# Altium footprint library WR-DSUB.PcbLib: 64 footprints (part 2 of 4)
Each footprint in its own frame and in the unit in brackets; x right, y up, seen from the top. Pads: shape width x height; smd on the part's side, far side on the other; paste and mask are expansions set on the pad; w line width, h text height; cw(c..) or ccw(c..) is an arc to the next point about the centre after c.
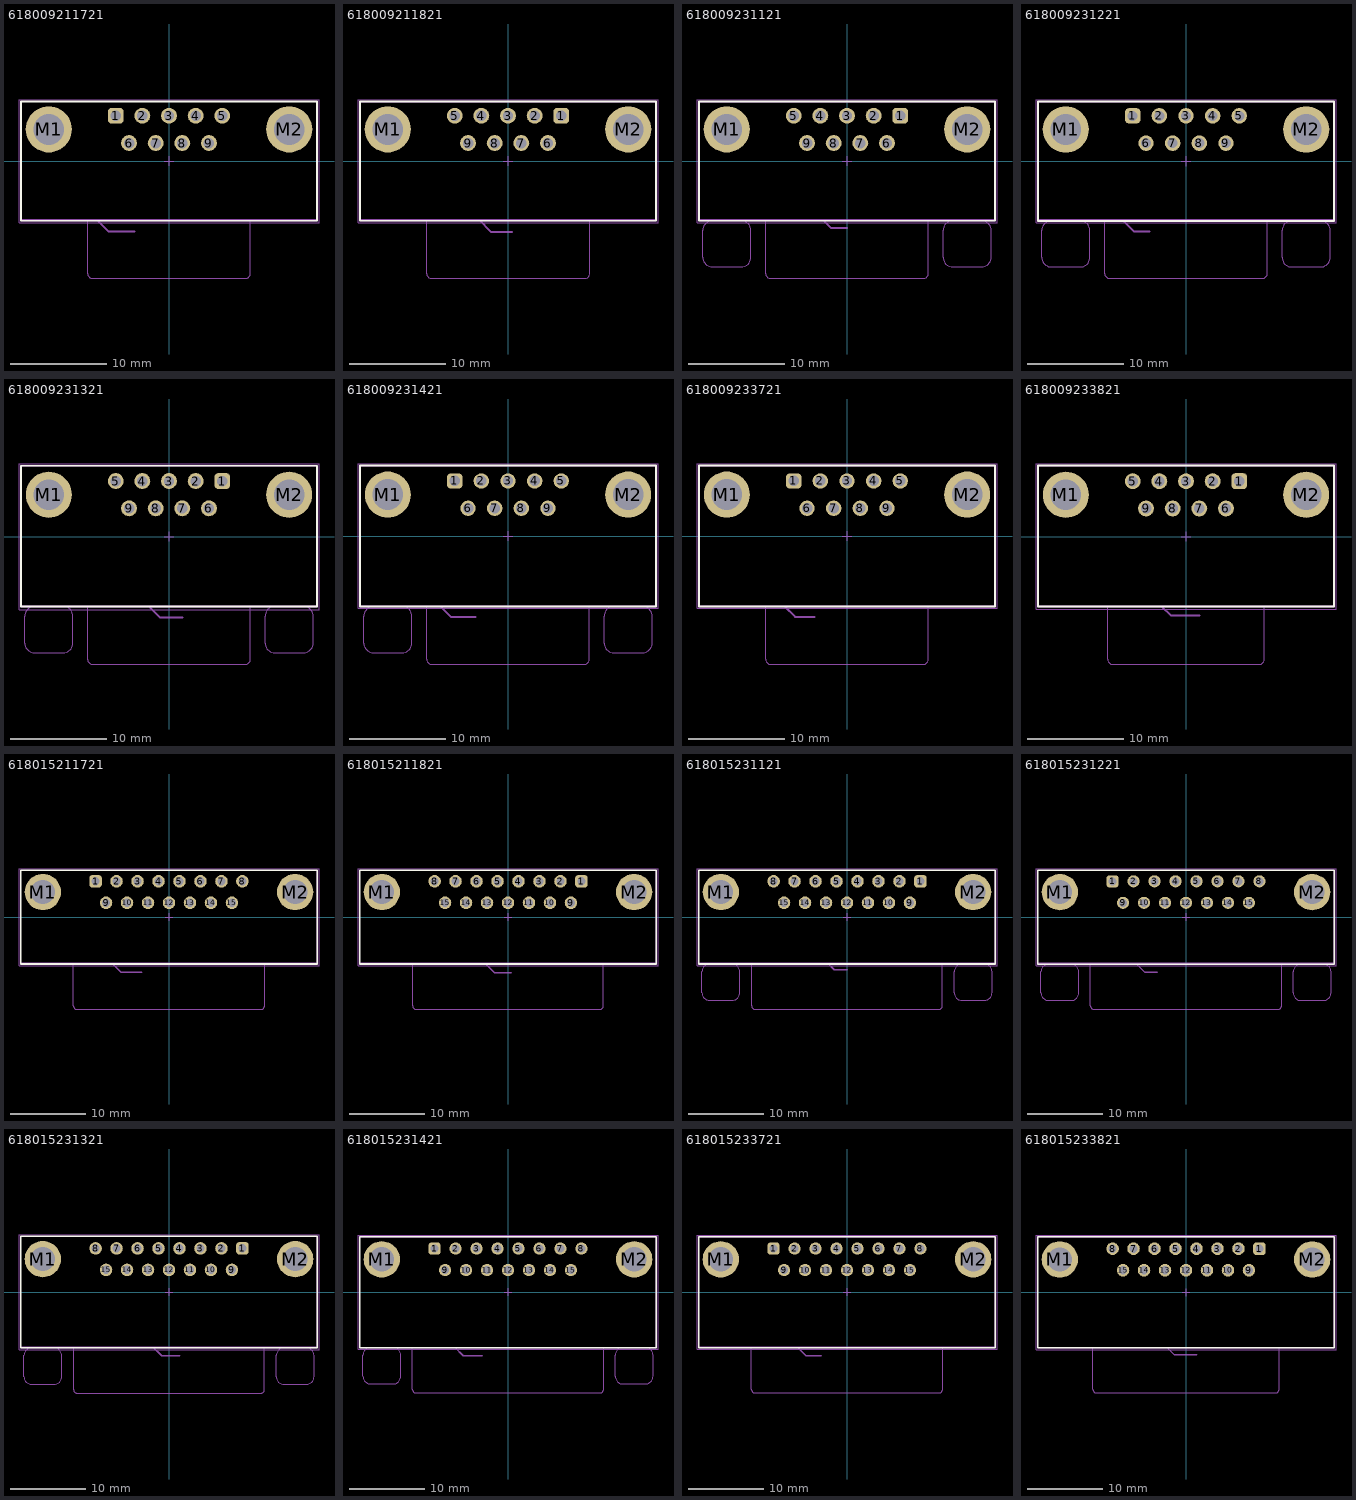
[diagram p1: the footprints below, top view; thin cyan lines are the x and y axes]

## 618009211721 [mm] "9 pins, right angled, 8.08mm, board lock & UNC4-40 rivet without hex screw"
height 12.5
pads (11):
  rrect50% 1.65x1.65 hole 1.09: 1(-5.54,4.72)
  round 1.65 hole 1.09: 2(-2.77,4.72) 3(0,4.72) 4(2.77,4.72) 5(5.54,4.72) 6(-4.155,1.88) 7(-1.385,1.88) 8(1.385,1.88) 9(4.155,1.88)
  round 4.8 hole 3.2: M1(-12.5,3.3) M2(12.5,3.3)
Top Overlay:
  lines w0.2: -15.4,-6.2 -15.4,6.2 15.4,6.2 15.4,-6.2 -15.4,-6.2
Assembly Notes:
  lines w0.2: -15.4,-6.12 15.4,-6.12 ; -7.5,-6.12 -6.32,-7.3 -3.6,-7.3
  text "PCB Edge" at -3.1,-7.8 h1.02
Top Assembly:
  lines w0.1: -8.46,-6.2 -8.46,-11.7 ccw(c-7.96,-11.7) -7.96,-12.2 7.96,-12.2 ; 8.46,-6.2 8.46,-11.7 cw(c7.96,-11.7) 7.96,-12.2 ; 7.96,-12.2 7.96,-12.2 ; -15.4,-6.2 15.4,-6.2 15.4,6.2 -15.4,6.2 -15.4,-6.2
Top Designator:
  text ".Designator" at -3.647,-0.357 h1
Top Courtyard:
  lines w0.05: -15.6,-6.4 -15.6,6.4 15.6,6.4 15.6,-6.4 -15.6,-6.4
Top Component Center:
  lines w0.1: -0.5,0 0.5,0 ; 0,-0.5 0,0.5
3D body "618009211721.stp": height 12.55, standoff -3.95, extent -15.4,-12.2 15.4,6.2

## 618009211821 [mm] "09p 8.08mm bracket, board lock & UNC4-40 Rivet without hex screw"
height 12.5
pads (11):
  rrect50% 1.65x1.65 hole 1.09: 1(5.54,4.72)
  round 1.65 hole 1.09: 2(2.77,4.72) 3(0,4.72) 4(-2.77,4.72) 5(-5.54,4.72) 6(4.155,1.88) 7(1.385,1.88) 8(-1.385,1.88) 9(-4.155,1.88)
  round 4.8 hole 3.2: M1(-12.5,3.3) M2(12.5,3.3)
Top Overlay:
  lines w0.2: -15.4,-6.2 -15.4,6.2 15.4,6.2 15.4,-6.2 -15.4,-6.2
Assembly Notes:
  lines w0.2: -15.4,-6.12 15.4,-6.12 ; -3,-6.12 -1.77,-7.35 0.4,-7.35
  text "PCB Edge" at 0.7,-8.05 h1.02
Top Assembly:
  lines w0.1: -8.45,-6.2 -8.45,-11.7 ccw(c-7.95,-11.7) -7.95,-12.2 ; -8,-12.2 8,-12.2 ccw(c8,-11.7) 8.5,-11.7 8.5,-6.2 ; -15.4,-6.2 15.4,-6.2 15.4,6.2 -15.4,6.2 -15.4,-6.2
Top Designator:
  text ".Designator" at -3.647,-0.357 h1
Top Courtyard:
  lines w0.05: -15.6,-6.4 15.6,-6.4 15.6,6.4 -15.6,6.4 -15.6,-6.4
Top Component Center:
  lines w0.1: -0.5,0 0.5,0 ; 0,-0.5 0,0.5
3D body "618009211821.stp": height 12.55, standoff -3.95, extent -15.4,-12.2 15.4,6.2

## 618009231121 [mm] "9 pins, right angled, 8.08mm, with hex screw"
height 12.5
pads (11):
  rrect50% 1.65x1.65 hole 1.09: 1(5.54,4.72)
  round 1.65 hole 1.09: 2(2.77,4.72) 3(0,4.72) 4(-2.77,4.72) 5(-5.54,4.72) 6(4.155,1.88) 7(1.385,1.88) 8(-1.385,1.88) 9(-4.155,1.88)
  round 4.8 hole 3.2: M1(-12.5,3.3) M2(12.5,3.3)
Top Overlay:
  lines w0.2: -15.4,-6.2 -15.4,6.2 15.4,6.2 15.4,-6.2 -15.4,-6.2
Assembly Notes:
  lines w0.2: -15.4,-6.12 15.4,-6.12 ; -2.5,-6.12 -1.67,-6.95 0,-6.95
  text "PCB Edge" at 0.4,-7.55 h1.02
Top Assembly:
  lines w0.1: -14,-6.2 ccw(c-14,-7.2) -15,-7.2 -15,-10 ccw(c-14,-10) -14,-11 -11,-11 ccw(c-11,-10) -10,-10 -10,-7.2 ccw(c-11,-7.2) -11,-6.2 ; -8.45,-6.2 -8.45,-11.7 ccw(c-7.95,-11.7) -7.95,-12.2 7.95,-12.2 ; 8.45,-6.2 8.45,-11.7 cw(c7.95,-11.7) 7.95,-12.2 ; 11,-6.2 ccw(c11,-7.2) 10,-7.2 10,-10 ccw(c11,-10) 11,-11 14,-11 ccw(c14,-10) 15,-10 15,-7.2 ccw(c14,-7.2) 14,-6.2 ; 7.95,-12.2 7.95,-12.2 ; -15.4,-6.2 15.4,-6.2 15.4,6.2 -15.4,6.2 -15.4,-6.2
Top Designator:
  text ".Designator" at -3.647,-0.357 h1
Top Courtyard:
  lines w0.05: -15.6,-6.4 -15.6,6.4 15.6,6.4 15.6,-6.4 -15.6,-6.4
Top Component Center:
  lines w0.1: -0.5,0 0.5,0 ; 0,-0.5 0,0.5
3D body "618009231121.stp": height 12.55, standoff -3.95, extent -15.4,-12.2 15.4,6.2

## 618009231221 [mm] "9 pins, right angled, 8.08mm, with hex screw"
height 12.5
pads (11):
  rrect50% 1.6x1.6 hole 1.04: 1(-5.54,4.72)
  round 1.6 hole 1.04: 2(-2.77,4.72) 3(0,4.72) 4(2.77,4.72) 5(5.54,4.72) 6(-4.155,1.88) 7(-1.385,1.88) 8(1.385,1.88) 9(4.155,1.88)
  round 4.8 hole 3.2: M1(-12.5,3.3) M2(12.5,3.3)
Top Overlay:
  lines w0.2: -15.4,-6.2 -15.4,6.2 15.4,6.2 15.4,-6.2 -15.4,-6.2
Assembly Notes:
  lines w0.2: -15.4,-6.12 15.4,-6.12 ; -6.6,-6.12 -5.42,-7.3 -3.8,-7.3
  text "PCB Edge" at -3.4,-7.82 h1.02
Top Assembly:
  lines w0.1: -14,-6.2 ccw(c-14,-7.2) -15,-7.2 -15,-10 ccw(c-14,-10) -14,-11 -11,-11 ccw(c-11,-10) -10,-10 -10,-7.2 ccw(c-11,-7.2) -11,-6.2 ; -8.46,-6.2 -8.46,-11.68 ccw(c-7.96,-11.68) -7.96,-12.18 7.94,-12.18 ; 7.96,-12.18 ccw(c7.96,-11.68) 8.46,-11.68 8.46,-6.2 ; 11,-6.2 ccw(c11,-7.2) 10,-7.2 10,-10 ccw(c11,-10) 11,-11 14,-11 ccw(c14,-10) 15,-10 15,-7.2 ccw(c14,-7.2) 14,-6.2 ; -15.4,-6.2 15.4,-6.2 15.4,6.2 -15.4,6.2 -15.4,-6.2 ; 7.95,-12.18 7.95,-12.18
Top Designator:
  text ".Designator" at -3.647,-0.357 h1
Top Courtyard:
  lines w0.05: -15.6,-6.4 15.6,-6.4 15.6,6.4 -15.6,6.4 -15.6,-6.4
Top Component Center:
  lines w0.1: -0.5,0 0.5,0 ; 0,-0.5 0,0.5
3D body "618009231221.stp": height 12.57, standoff -3.97, extent -15.4,-12.2 15.4,6.2

## 618009231321 [mm] "9 pins, right angled, 10.3mm, with hex screw"
height 12.5
pads (11):
  rrect50% 1.65x1.65 hole 1.09: 1(5.54,5.78)
  round 1.65 hole 1.09: 2(2.77,5.78) 3(0,5.78) 4(-2.77,5.78) 5(-5.54,5.78) 6(4.155,2.94) 7(1.385,2.94) 8(-1.385,2.94) 9(-4.155,2.94)
  round 4.8 hole 3.2: M1(-12.495,4.36) M2(12.495,4.36)
Top Overlay:
  lines w0.2: -15.4,-7.28 15.4,-7.28 15.4,7.37 -15.4,7.37 -15.4,-7.28
Assembly Notes:
  lines w0.2: -15.4,-7.26 15.4,-7.26 ; -2.1,-7.26 -0.96,-8.4 1.4,-8.4
  text "PCB Edge" at 1.8,-8.8 h1.02
Top Assembly:
  lines w0.1: -14,-7.28 ccw(c-14,-8.28) -15,-8.28 -15,-11.08 ccw(c-14,-11.08) -14,-12.08 -11,-12.08 ccw(c-11,-11.08) -10,-11.08 -10,-8.28 ccw(c-11,-8.28) -11,-7.28 ; -8.45,-7.28 -8.45,-12.78 ccw(c-7.95,-12.78) -7.95,-13.28 7.95,-13.28 ; 8.45,-7.28 8.45,-12.78 cw(c7.95,-12.78) 7.95,-13.28 ; 11,-7.28 ccw(c11,-8.28) 10,-8.28 10,-11.08 ccw(c11,-11.08) 11,-12.08 14,-12.08 ccw(c14,-11.08) 15,-11.08 15,-8.28 ccw(c14,-8.28) 14,-7.28 ; 7.95,-13.28 7.95,-13.28 ; -15.4,-7.28 -15.4,7.37 15.4,7.37 15.4,-7.28 -15.4,-7.28
Top Designator:
  text ".Designator" at -3.647,-0.357 h1
Top Courtyard:
  lines w0.05: -15.6,-7.59 -15.6,7.59 15.6,7.59 15.6,-7.59 -15.6,-7.59
Top Component Center:
  lines w0.1: -0.5,0 0.5,0 ; 0,-0.5 0,0.5
3D body "618009231321.stp": height 12.57, standoff -3.77, extent -15.408,-13.28 15.408,7.37

## 618009231421 [mm] "9 pins, right angled, 10.3mm, with hex screw"
height 12.5
pads (11):
  rrect50% 1.6x1.6 hole 1.09: 1(-5.54,5.735)
  round 1.6 hole 1.09: 2(-2.77,5.735) 3(0,5.735) 4(2.77,5.735) 5(5.54,5.735) 6(-4.155,2.895) 7(-1.385,2.895) 8(1.385,2.895) 9(4.155,2.895)
  round 4.8 hole 3.2: M1(-12.495,4.315) M2(12.495,4.315)
Top Overlay:
  lines w0.2: -15.4,-7.325 -15.4,7.325 15.4,7.325 15.4,-7.325 -15.4,-7.325
Assembly Notes:
  lines w0.2: -15.4,-7.325 15.4,-7.325 ; -7,-7.325 -5.905,-8.42 -3.4,-8.42
  text "PCB Edge" at -3.1,-8.92 h1.02
Top Assembly:
  lines w0.1: -14,-7.325 ccw(c-14,-8.325) -15,-8.325 -15,-11.125 ccw(c-14,-11.125) -14,-12.125 -11,-12.125 ccw(c-11,-11.125) -10,-11.125 -10,-8.325 ccw(c-11,-8.325) -11,-7.325 ; -8.45,-7.325 -8.45,-12.825 ccw(c-7.95,-12.825) -7.95,-13.325 7.95,-13.325 ; 8.45,-7.325 8.45,-12.825 cw(c7.95,-12.825) 7.95,-13.325 ; 11,-7.325 ccw(c11,-8.325) 10,-8.325 10,-11.125 ccw(c11,-11.125) 11,-12.125 14,-12.125 ccw(c14,-11.125) 15,-11.125 15,-8.325 ccw(c14,-8.325) 14,-7.325 ; 7.95,-13.325 7.95,-13.325 ; -15.4,-7.325 15.4,-7.325 15.4,7.325 -15.4,7.325 -15.4,-7.325
Top Designator:
  text ".Designator" at -3.647,-0.357 h1
Top Courtyard:
  lines w0.05: -15.6,-7.525 15.6,-7.525 15.6,7.525 -15.6,7.525 -15.6,-7.525
Top Component Center:
  lines w0.1: -0.5,0 0.5,0 ; 0,-0.5 0,0.5
3D body "618009231421.stp": height 12.62, standoff -3.72, extent -15.405,-13.325 15.405,7.325

## 618009233721 [mm] "9 pins, right angled, 10.3mm, board lock & UNC4-40 rivet without hex screw"
height 12.5
pads (11):
  rrect50% 1.6x1.6 hole 1.09: 1(-5.54,5.735)
  round 1.6 hole 1.09: 2(-2.77,5.735) 3(0,5.735) 4(2.77,5.735) 5(5.54,5.735) 6(-4.155,2.895) 7(-1.385,2.895) 8(1.385,2.895) 9(4.155,2.895)
  round 4.8 hole 3.2: M1(-12.495,4.315) M2(12.495,4.315)
Top Overlay:
  lines w0.2: -15.4,-7.325 -15.4,7.325 15.4,7.325 15.4,-7.325 -15.4,-7.325
Assembly Notes:
  lines w0.2: -15.4,-7.305 15.4,-7.305 ; -6.5,-7.305 -5.405,-8.4 -3.4,-8.4
  text "PCB Edge" at -3.1,-9 h1.02
Top Assembly:
  lines w0.1: -8.46,-7.325 -8.46,-12.825 ccw(c-7.96,-12.825) -7.96,-13.325 7.96,-13.325 ccw(c7.96,-12.825) 8.46,-12.825 8.46,-7.325 ; -15.4,-7.325 15.4,-7.325 15.4,7.325 -15.4,7.325 -15.4,-7.325
Top Designator:
  text ".Designator" at -3.647,-0.357 h1
Top Courtyard:
  lines w0.05: -15.6,-7.525 -15.6,7.525 15.6,7.525 15.6,-7.525 -15.6,-7.525
Top Component Center:
  lines w0.1: -0.5,0 0.5,0 ; 0,-0.5 0,0.5
3D body "618009233721.stp": height 12.57, standoff -3.77, extent -15.408,-13.325 15.408,7.325

## 618009233821 [mm] "09p 10.3mm bracket, board lock & UNC4-40 Rivet without hex screw"
height 12.5
pads (11):
  rrect50% 1.65x1.65 hole 1.09: 1(5.54,5.765)
  round 1.65 hole 1.09: 2(2.77,5.765) 3(0,5.765) 4(-2.77,5.765) 5(-5.54,5.765) 6(4.155,2.925) 7(1.385,2.925) 8(-1.385,2.925) 9(-4.155,2.925)
  round 4.8 hole 3.2: M1(-12.495,4.345) M2(12.495,4.345)
Top Overlay:
  lines w0.2: -15.4,-7.275 15.4,-7.275 15.4,7.375 -15.4,7.375 -15.4,-7.275
Assembly Notes:
  lines w0.2: -15.4,-7.275 15.4,-7.275 ; -2.5,-7.275 -1.575,-8.2 1.4,-8.2
  text "PCB Edge" at 1.8,-8.7 h1.02
Top Assembly:
  lines w0.1: -8.15,-7.275 -8.15,-12.775 ccw(c-7.65,-12.775) -7.65,-13.275 7.65,-13.275 ; 8.15,-7.275 8.15,-12.775 cw(c7.65,-12.775) 7.65,-13.275 ; 7.65,-13.275 7.65,-13.275 ; -15.4,-7.275 -15.4,7.375 15.4,7.375 15.4,-7.275 -15.4,-7.275
Top Designator:
  text ".Designator" at -3.647,-0.357 h1
Top Courtyard:
  lines w0.05: -15.6,-7.575 -15.6,7.575 15.6,7.575 15.6,-7.575 -15.6,-7.575
Top Component Center:
  lines w0.1: -0.5,0 0.5,0 ; 0,-0.5 0,0.5
3D body "618009233821.stp": height 12.57, standoff -3.77, extent -15.408,-13.275 15.408,7.375

## 618015211721 [mm] "15 pins, right angled, 8.08mm, board lock & UNC4-40 rivet without hex screw"
height 12.5
pads (17):
  rrect50% 1.65x1.65 hole 1.09: 1(-9.695,4.72)
  round 1.65 hole 1.09: 2(-6.925,4.72) 3(-4.155,4.72) 4(-1.385,4.72) 5(1.385,4.72) 6(4.155,4.72) 7(6.925,4.72) 8(9.695,4.72) 9(-8.31,1.88) 10(-5.54,1.88) 11(-2.77,1.88) 12(0,1.88) 13(2.77,1.88) 14(5.54,1.88) 15(8.31,1.88)
  round 4.8 hole 3.2: M1(-16.65,3.3) M2(16.65,3.3)
Top Overlay:
  lines w0.2: -19.6,-6.2 -19.6,6.2 19.6,6.2 19.6,-6.2 -19.6,-6.2
Assembly Notes:
  lines w0.2: -19.6,-6.12 19.6,-6.12 ; -7.5,-6.12 -6.32,-7.3 -3.6,-7.3
  text "PCB Edge" at -3.1,-7.8 h1.02
Top Assembly:
  lines w0.1: -12.625,-6.2 -12.625,-11.7 ccw(c-12.125,-11.7) -12.125,-12.2 12.125,-12.2 ccw(c12.125,-11.7) 12.625,-11.7 12.625,-6.2 ; -19.6,-6.2 19.6,-6.2 19.6,6.2 -19.6,6.2 -19.6,-6.2
Top Designator:
  text ".Designator" at -3.647,-0.357 h1
Top Courtyard:
  lines w0.05: -19.8,-6.4 -19.8,6.4 19.8,6.4 19.8,-6.4 -19.8,-6.4
Top Component Center:
  lines w0.1: -0.5,0 0.5,0 ; 0,-0.5 0,0.5
3D body "618015211721.stp": height 12.55, standoff -3.95, extent -19.6,-12.2 19.6,6.2

## 618015211821 [mm] "15p 8.08mm bracket, board lock & UNC4-40 Rivet without hex screw"
height 12.5
pads (17):
  rrect50% 1.65x1.65 hole 1.09: 1(9.695,4.72)
  round 1.65 hole 1.09: 2(6.925,4.72) 3(4.155,4.72) 4(1.385,4.72) 5(-1.385,4.72) 6(-4.155,4.72) 7(-6.925,4.72) 8(-9.695,4.72) 9(8.31,1.88) 10(5.54,1.88) 11(2.77,1.88) 12(0,1.88) 13(-2.77,1.88) 14(-5.54,1.88) 15(-8.31,1.88)
  round 4.8 hole 3.2: M1(-16.65,3.3) M2(16.65,3.3)
Top Overlay:
  lines w0.2: -19.6,-6.2 -19.6,6.2 19.6,6.2 19.6,-6.2 -19.6,-6.2
Assembly Notes:
  lines w0.2: -19.6,-6.12 19.6,-6.12 ; -3,-6.12 -1.77,-7.35 0.4,-7.35
  text "PCB Edge" at 0.7,-8.05 h1.02
Top Assembly:
  lines w0.1: -12.6,-6.2 -12.6,-11.7 ccw(c-12.1,-11.7) -12.1,-12.2 ; -12.15,-12.2 12.1,-12.2 ccw(c12.1,-11.7) 12.6,-11.7 12.6,-6.2 ; -19.6,-6.2 19.6,-6.2 19.6,6.2 -19.6,6.2 -19.6,-6.2
Top Designator:
  text ".Designator" at -3.647,-0.357 h1
Top Courtyard:
  lines w0.05: -19.8,-6.4 -19.8,6.4 19.8,6.4 19.8,-6.4 -19.8,-6.4
Top Component Center:
  lines w0.1: -0.5,0 0.5,0 ; 0,-0.5 0,0.5
3D body "618015211821.stp": height 12.55, standoff -3.95, extent -19.6,-12.2 19.6,6.2

## 618015231121 [mm] "15 pins, right angled, 8.08mm, with hex screw"
height 12.5
pads (17):
  rrect50% 1.65x1.65 hole 1.09: 1(9.695,4.72)
  round 1.65 hole 1.09: 2(6.925,4.72) 3(4.155,4.72) 4(1.385,4.72) 5(-1.385,4.72) 6(-4.155,4.72) 7(-6.925,4.72) 8(-9.695,4.72) 9(8.31,1.88) 10(5.54,1.88) 11(2.77,1.88) 12(0,1.88) 13(-2.77,1.88) 14(-5.54,1.88) 15(-8.31,1.88)
  round 4.8 hole 3.2: M1(-16.65,3.3) M2(16.65,3.3)
Top Overlay:
  lines w0.2: -19.6,-6.2 19.6,-6.2 19.6,6.2 -19.6,6.2 -19.6,-6.2
Assembly Notes:
  lines w0.2: -19.6,-6.12 19.6,-6.12 ; -2.5,-6.12 -1.67,-6.95 0,-6.95
  text "PCB Edge" at 0.4,-7.55 h1.02
Top Assembly:
  lines w0.1: -18.15,-6.2 ccw(c-18.15,-7.2) -19.15,-7.2 -19.15,-10 ccw(c-18.15,-10) -18.15,-11 -15.15,-11 ccw(c-15.15,-10) -14.15,-10 -14.15,-7.2 ccw(c-15.15,-7.2) -15.15,-6.2 ; -12.6,-6.2 -12.6,-11.7 ccw(c-12.1,-11.7) -12.1,-12.2 12.1,-12.2 ccw(c12.1,-11.7) 12.6,-11.7 12.6,-6.2 ; 15.15,-6.2 ccw(c15.15,-7.2) 14.15,-7.2 14.15,-10 ccw(c15.15,-10) 15.15,-11 18.15,-11 ccw(c18.15,-10) 19.15,-10 19.15,-7.2 ccw(c18.15,-7.2) 18.15,-6.2 ; -19.6,-6.2 19.6,-6.2 19.6,6.2 -19.6,6.2 -19.6,-6.2 ; 3.8,-12.2 3.8,-12.2
Top Designator:
  text ".Designator" at -3.647,-0.357 h1
Top Courtyard:
  lines w0.05: -19.8,-6.4 -19.8,6.4 19.8,6.4 19.8,-6.4 -19.8,-6.4
Top Component Center:
  lines w0.1: -0.5,0 0.5,0 ; 0,-0.5 0,0.5
3D body "618015231121.stp": height 12.55, standoff -3.95, extent -19.6,-12.2 19.6,6.2

## 618015231221 [mm] "15 pins, right angled, 8.08mm, with hex screw"
height 12.5
pads (17):
  rrect50% 1.6x1.6 hole 1.04: 1(-9.695,4.72)
  round 1.6 hole 1.04: 2(-6.925,4.72) 3(-4.155,4.72) 4(-1.385,4.72) 5(1.385,4.72) 6(4.155,4.72) 7(6.925,4.72) 8(9.695,4.72) 9(-8.31,1.88) 10(-5.54,1.88) 11(-2.77,1.88) 12(0,1.88) 13(2.77,1.88) 14(5.54,1.88) 15(8.31,1.88)
  round 4.8 hole 3.2: M1(-16.65,3.3) M2(16.65,3.3)
Top Overlay:
  lines w0.2: -19.6,-6.2 -19.6,6.2 19.6,6.2 19.6,-6.2 -19.6,-6.2
Assembly Notes:
  lines w0.2: -19.6,-6.12 19.6,-6.12 ; -6.6,-6.12 -5.42,-7.3 -3.8,-7.3
  text "PCB Edge" at -3.4,-7.82 h1.02
Top Assembly:
  lines w0.1: -18.15,-6.2 ccw(c-18.15,-7.2) -19.15,-7.2 -19.15,-10 ccw(c-18.15,-10) -18.15,-11 -15.15,-11 ccw(c-15.15,-10) -14.15,-10 -14.15,-7.2 ccw(c-15.15,-7.2) -15.15,-6.2 ; -12.625,-6.2 -12.625,-11.68 ccw(c-12.125,-11.68) -12.125,-12.18 12.125,-12.18 ccw(c12.125,-11.68) 12.625,-11.68 12.625,-6.2 ; 15.15,-6.2 ccw(c15.15,-7.2) 14.15,-7.2 14.15,-10 ccw(c15.15,-10) 15.15,-11 18.15,-11 ccw(c18.15,-10) 19.15,-10 19.15,-7.2 ccw(c18.15,-7.2) 18.15,-6.2 ; -19.6,-6.2 19.6,-6.2 19.6,6.2 -19.6,6.2 -19.6,-6.2
Top Designator:
  text ".Designator" at -3.647,-0.357 h1
Top Courtyard:
  lines w0.05: -19.8,-6.4 19.8,-6.4 19.8,6.4 -19.8,6.4 -19.8,-6.4
Top Component Center:
  lines w0.1: -0.5,0 0.5,0 ; 0,-0.5 0,0.5
3D body "618015231221.stp": height 12.55, standoff -3.95, extent -19.6,-12.2 19.6,6.2

## 618015231321 [mm] "15 pins, right angled, 10.3mm, with hex screw"
height 12.5
pads (17):
  rrect50% 1.65x1.65 hole 1.09: 1(9.695,5.78)
  round 1.65 hole 1.09: 2(6.925,5.78) 3(4.155,5.78) 4(1.385,5.78) 5(-1.385,5.78) 6(-4.155,5.78) 7(-6.925,5.78) 8(-9.695,5.78) 9(8.31,2.94) 10(5.54,2.94) 11(2.77,2.94) 12(0,2.94) 13(-2.77,2.94) 14(-5.54,2.94) 15(-8.31,2.94)
  round 4.8 hole 3.2: M1(-16.66,4.36) M2(16.66,4.36)
Top Overlay:
  lines w0.2: -19.6,-7.36 -19.6,7.37 19.6,7.37 19.6,-7.36 -19.6,-7.36
Assembly Notes:
  lines w0.2: -19.6,-7.26 19.6,-7.26 ; -2.1,-7.26 -0.96,-8.4 1.4,-8.4
  text "PCB Edge" at 1.8,-8.8 h1.02
Top Assembly:
  lines w0.1: -18.15,-7.36 ccw(c-18.15,-8.36) -19.15,-8.36 -19.15,-11.16 ccw(c-18.15,-11.16) -18.15,-12.16 -15.15,-12.16 ccw(c-15.15,-11.16) -14.15,-11.16 -14.15,-8.36 ccw(c-15.15,-8.36) -15.15,-7.36 ; -12.6,-7.36 -12.6,-12.86 ccw(c-12.1,-12.86) -12.1,-13.36 12.1,-13.36 ; 12.6,-7.36 12.6,-12.86 cw(c12.1,-12.86) 12.1,-13.36 ; 15.15,-7.36 ccw(c15.15,-8.36) 14.15,-8.36 14.15,-11.16 ccw(c15.15,-11.16) 15.15,-12.16 18.15,-12.16 ccw(c18.15,-11.16) 19.15,-11.16 19.15,-8.36 ccw(c18.15,-8.36) 18.15,-7.36 ; 12.1,-13.36 12.1,-13.36 ; -19.6,-7.36 19.6,-7.36 19.6,7.37 -19.6,7.37 -19.6,-7.36
Top Designator:
  text ".Designator" at -3.647,-0.357 h1
Top Courtyard:
  lines w0.05: -19.8,-7.59 19.8,-7.59 19.8,7.59 -19.8,7.59 -19.8,-7.59
Top Component Center:
  lines w0.1: -0.5,0 0.5,0 ; 0,-0.5 0,0.5
3D body "618015231321.stp": height 12.57, standoff -3.77, extent -19.575,-13.28 19.575,7.37

## 618015231421 [mm] "15 pins, right angled, 10.3mm, with hex screw"
height 12.5
pads (17):
  rrect50% 1.6x1.6 hole 1.09: 1(-9.695,5.735)
  round 1.6 hole 1.09: 2(-6.925,5.735) 3(-4.155,5.735) 4(-1.385,5.735) 5(1.385,5.735) 6(4.155,5.735) 7(6.925,5.735) 8(9.695,5.735) 9(-8.31,2.895) 10(-5.54,2.895) 11(-2.77,2.895) 12(0,2.895) 13(2.77,2.895) 14(5.54,2.895) 15(8.31,2.895)
  round 4.8 hole 3.2: M1(-16.66,4.315) M2(16.66,4.315)
Top Overlay:
  lines w0.2: -19.6,-7.325 -19.6,7.325 19.6,7.325 19.6,-7.325 -19.6,-7.325
Assembly Notes:
  lines w0.2: -19.6,-7.325 19.6,-7.325 ; -7,-7.325 -5.905,-8.42 -3.4,-8.42
  text "PCB Edge" at -3.1,-8.92 h1.02
Top Assembly:
  lines w0.1: -18.15,-7.325 ccw(c-18.15,-8.325) -19.15,-8.325 -19.15,-11.125 ccw(c-18.15,-11.125) -18.15,-12.125 -15.15,-12.125 ccw(c-15.15,-11.125) -14.15,-11.125 -14.15,-8.325 ccw(c-15.15,-8.325) -15.15,-7.325 ; -12.625,-7.325 -12.625,-12.825 ccw(c-12.125,-12.825) -12.125,-13.325 12.125,-13.325 ccw(c12.125,-12.825) 12.625,-12.825 12.625,-7.325 ; 15.15,-7.325 ccw(c15.15,-8.325) 14.15,-8.325 14.15,-11.125 ccw(c15.15,-11.125) 15.15,-12.125 18.15,-12.125 ccw(c18.15,-11.125) 19.15,-11.125 19.15,-8.325 ccw(c18.15,-8.325) 18.15,-7.325 ; -19.6,-7.325 19.6,-7.325 19.6,7.325 -19.6,7.325 -19.6,-7.325
Top Designator:
  text ".Designator" at -3.647,-0.357 h1
Top Courtyard:
  lines w0.05: -19.8,-7.525 19.8,-7.525 19.8,7.525 -19.8,7.525 -19.8,-7.525
Top Component Center:
  lines w0.1: -0.5,0 0.5,0 ; 0,-0.5 0,0.5
3D body "618015231421.stp": height 12.62, standoff -3.72, extent -19.57,-13.325 19.57,7.325

## 618015233721 [mm] "15 pins, right angled, 10.3mm, board lock & UNC4-40 rivet without hex screw"
height 12.5
pads (17):
  rrect50% 1.6x1.6 hole 1.09: 1(-9.695,5.735)
  round 1.6 hole 1.09: 2(-6.925,5.735) 3(-4.155,5.735) 4(-1.385,5.735) 5(1.385,5.735) 6(4.155,5.735) 7(6.925,5.735) 8(9.695,5.735) 9(-8.31,2.895) 10(-5.54,2.895) 11(-2.77,2.895) 12(0,2.895) 13(2.77,2.895) 14(5.54,2.895) 15(8.31,2.895)
  round 4.8 hole 3.2: M1(-16.66,4.315) M2(16.66,4.315)
Top Overlay:
  lines w0.2: -19.6,-7.325 19.6,-7.325 19.6,7.325 -19.6,7.325 -19.6,-7.325
Assembly Notes:
  lines w0.2: -19.6,-7.305 19.6,-7.305 ; -6.5,-7.305 -5.405,-8.4 -3.4,-8.4
  text "PCB Edge" at -3.1,-9 h1.02
Top Assembly:
  lines w0.1: -12.625,-7.325 -12.625,-12.825 ccw(c-12.125,-12.825) -12.125,-13.325 12.125,-13.325 ccw(c12.125,-12.825) 12.625,-12.825 12.625,-7.325 ; -19.6,-7.325 -19.6,7.325 19.6,7.325 19.6,-7.325 -19.6,-7.325
Top Designator:
  text ".Designator" at -3.647,-0.357 h1
Top Courtyard:
  lines w0.05: -19.8,-7.525 19.8,-7.525 19.8,7.525 -19.8,7.525 -19.8,-7.525
Top Component Center:
  lines w0.1: -0.5,0 0.5,0 ; 0,-0.5 0,0.5
3D body "618015233721.stp": height 12.57, standoff -3.77, extent -19.573,-13.325 19.573,7.325

## 618015233821 [mm] "15p 10.3mm bracket, board lock & UNC4-40 Rivet without hex screw"
height 12.5
pads (17):
  rrect50% 1.65x1.65 hole 1.09: 1(9.695,5.765)
  round 1.65 hole 1.09: 2(6.925,5.765) 3(4.155,5.765) 4(1.385,5.765) 5(-1.385,5.765) 6(-4.155,5.765) 7(-6.925,5.765) 8(-9.695,5.765) 9(8.31,2.925) 10(5.54,2.925) 11(2.77,2.925) 12(0,2.925) 13(-2.77,2.925) 14(-5.54,2.925) 15(-8.31,2.925)
  round 4.8 hole 3.2: M1(-16.66,4.345) M2(16.66,4.345)
Top Overlay:
  lines w0.2: -19.6,-7.275 19.6,-7.275 19.6,7.375 -19.6,7.375 -19.6,-7.275
Assembly Notes:
  lines w0.2: -19.6,-7.275 19.6,-7.275 ; -2.5,-7.275 -1.575,-8.2 1.4,-8.2
  text "PCB Edge" at 1.8,-8.7 h1.02
Top Assembly:
  lines w0.1: -12.3,-7.275 -12.3,-12.775 ccw(c-11.8,-12.775) -11.8,-13.275 11.8,-13.275 ; 12.3,-7.275 12.3,-12.775 cw(c11.8,-12.775) 11.8,-13.275 ; 11.8,-13.275 11.8,-13.275 ; -19.6,-7.275 -19.6,7.375 19.6,7.375 19.6,-7.275 -19.6,-7.275
Top Designator:
  text ".Designator" at -3.647,-0.357 h1
Top Courtyard:
  lines w0.05: -19.8,-7.575 -19.8,7.575 19.8,7.575 19.8,-7.575 -19.8,-7.575
Top Component Center:
  lines w0.1: -0.5,0 0.5,0 ; 0,-0.5 0,0.5
3D body "618015233821.stp": height 12.57, standoff -3.77, extent -19.575,-13.275 19.575,7.375